# Altium footprint library Altium_Lib_Haris.PcbLib: 85 footprints (part 4 of 6)
Each footprint in its own frame and in the unit in brackets; x right, y up, seen from the top. Pads: shape width x height; smd on the part's side, far side on the other; paste and mask are expansions set on the pad; w line width, h text height; cw(c..) or ccw(c..) is an arc to the next point about the centre after c.
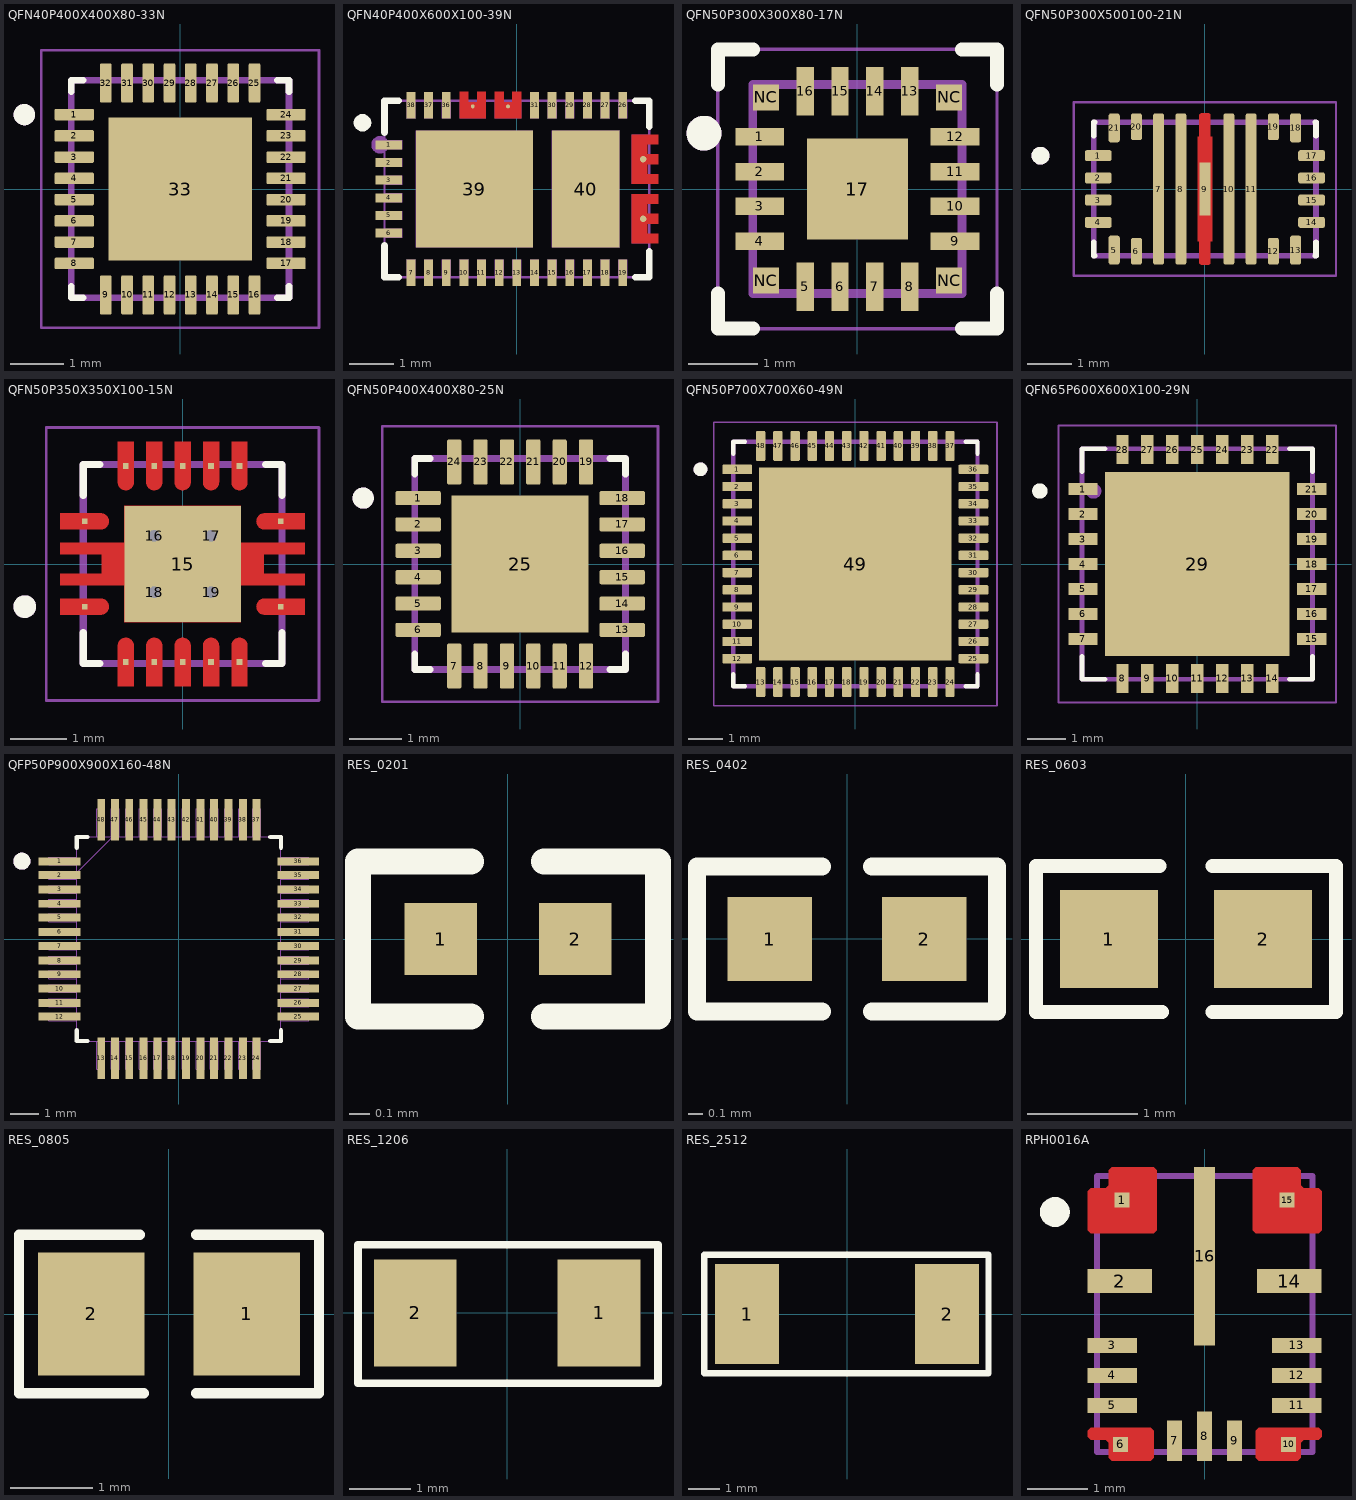
[diagram p3: the footprints below, top view; thin cyan lines are the x and y axes]

## QFN40P400X400X80-33N [mm]
pads (33):
  rrect25% 0.74x0.22 smd paste+0 mask+0.102: 1(-1.995,1.4) 2(-1.995,1) 3(-1.995,0.6) 4(-1.995,0.2) 5(-1.995,-0.2) 6(-1.995,-0.6) 7(-1.995,-1) 8(-1.995,-1.4) 17(1.995,-1.4) 18(1.995,-1) 19(1.995,-0.6) 20(1.995,-0.2) 21(1.995,0.2) 22(1.995,0.6) 23(1.995,1) 24(1.995,1.4)
  rrect25% 0.22x0.74 smd paste+0 mask+0.102: 9(-1.4,-1.995) 10(-1,-1.995) 11(-0.6,-1.995) 12(-0.2,-1.995) 13(0.2,-1.995) 14(0.6,-1.995) 15(1,-1.995) 16(1.4,-1.995) 25(1.4,1.995) 26(1,1.995) 27(0.6,1.995) 28(0.2,1.995) 29(-0.2,1.995) 30(-0.6,1.995) 31(-1,1.995) 32(-1.4,1.995)
  rect 2.7x2.7 smd paste-0.5 mask+0.102: 33(0,0)
Top Overlay:
  circle w0.2: c-2.935,1.4 r0.1
  lines w0.127: -2.05,-1.83 -2.05,-2.05 -1.83,-2.05 ; -2.05,1.83 -2.05,2.05 -1.83,2.05 ; 1.83,-2.05 2.05,-2.05 2.05,-1.83 ; 1.83,2.05 2.05,2.05 2.05,1.83
Mechanical 13:
  circle w0.2: c-2.935,1.4 r0.1
  lines w0.127: -2.05,-2.05 2.05,-2.05 2.05,2.05 -2.05,2.05 -2.05,-2.05
Mechanical 15:
  lines w0.05: -2.615,-2.615 2.615,-2.615 2.615,2.615 -2.615,2.615 -2.615,-2.615
3D body "step_temp.STEP": height 0.8, standoff 0, extent -2,-2 2,2

## QFN40P400X600X100-39N [mil]
pads (34):
  rect 23.6x7.9 smd paste-3937 mask+2: 1(-114.1,39.4) 2(-114.1,23.6) 3(-114.1,7.9) 4(-114.1,-7.9) 5(-114.1,-23.6) 6(-114.1,-39.4)
  rect 7.9x23.6 smd paste-3937 mask+2: 7(-94.4,-74.8) 8(-78.7,-74.8) 9(-62.9,-74.8) 10(-47.2,-74.8) 11(-31.5,-74.8) 12(-15.7,-74.8) 13(0,-74.8) 14(15.8,-74.8) 15(31.5,-74.8) 16(47.3,-74.8) 17(63,-74.8) 18(78.8,-74.8) 19(94.5,-74.8) 26(94.5,74.8) 27(78.8,74.8) 28(63,74.8) 29(47.3,74.8) 30(31.5,74.8) 31(15.8,74.8) 36(-62.9,74.8) 37(-78.7,74.8) 38(-94.4,74.8)
  round 5.7 smd: 21(112.8,-26.6) 24(112.8,26.6)
  round 3.5 smd: 32(-7.8,73.7) 34(-39.3,73.7)
  rect 104.3x104.3 smd paste-3937 mask+2: 39(-37.9,0)
  rect 60.2x104.3 smd paste-3937 mask+2: 40(61.5,0)
Top Layer:
  region: 126,-13.2 126,-4.5 116.6,-4.5 102.4,-4.5 102.4,-13.2 102.4,-22.2 102.4,-30.9 102.4,-39.9 102.4,-48.6 116.6,-48.6 126,-48.6 126,-39.9 116.6,-39.9 116.6,-30.9 126,-30.9 126,-22.2 116.6,-22.2 116.6,-13.2
  region: 126,40 126,48.6 116.6,48.6 102.4,48.6 102.4,40 102.4,30.9 102.4,22.3 102.4,13.2 102.4,4.5 116.6,4.5 126,4.5 126,13.2 116.6,13.2 116.6,22.3 126,22.3 126,30.9 116.6,30.9 116.6,40
  region: 4,63 4,86.6 -3.9,86.6 -3.9,77.2 -11.8,77.2 -11.8,86.6 -19.6,86.6 -19.6,77.2 -19.7,77.2 -19.7,63 -19.6,63 -11.8,63 -3.9,63 4,63
  region: -27.5,77.2 -27.5,86.6 -35.4,86.6 -35.4,77.2 -43.3,77.2 -43.3,86.6 -51.1,86.6 -51.1,77.2 -51.1,63 -43.3,63 -35.4,63 -27.5,63 -27.5,77.2
Top Overlay:
  lines w6: -118.1,-50.4 -118.1,-78.7 -105.5,-78.7 ; -118.1,50.4 -118.1,78.8 -105.5,78.8 ; 105.6,-78.7 118.1,-78.7 118.1,-55.7 ; 105.6,78.8 118.1,78.8 118.1,55.7
  lines w7.9: -141.7,59.1 -141.3,57.4 -140.2,56 -138.6,55.2 -136.9,55.2 -135.3,56 -134.2,57.4 -133.8,59.1 -134.2,60.8 -135.3,62.1 -136.9,62.9 -138.6,62.9 -140.2,62.1 -141.3,60.8 -141.7,59.1
Top Paste:
  drawing of 34 lines, arcs and shapes, not listed
Mechanical 6:
  lines w7.9: -125.9,39.4 -125.6,37.7 -124.5,36.3 -122.9,35.5 -121.1,35.5 -119.6,36.3 -118.5,37.7 -118.1,39.4 -118.5,41.1 -119.6,42.5 -121.1,43.2 -122.9,43.2 -124.5,42.5 -125.6,41.1 -125.9,39.4
Mechanical 7:
  lines w2: -118.1,-78.7 118.1,-78.7 118.1,78.8 -118.1,78.8 -118.1,-78.7
Mechanical 8:
  region: -115.7,78.8 -116.1,77.5 -117.1,76.6 -118.4,76.4 -119.6,77 -120.3,78.1 -120.3,79.4 -119.6,80.5 -118.4,81.1 -117.1,80.9 -116.1,80
Mechanical 9:
  drawing of 44 lines, arcs and shapes, not listed
3D body "TPS25751DREFR--3DModel-STEP-56544.STEP": height 32, standoff 0.5, extent -118.11,-78.74 118.11,78.74

## QFN50P300X300X80-17N [mm]
pads (21):
  rect 0.7x0.25 smd: 1(-1.4,0.75) 2(-1.4,0.25) 3(-1.4,-0.25) 4(-1.4,-0.75) 9(1.4,-0.75) 10(1.4,-0.25) 11(1.4,0.25) 12(1.4,0.75)
  rect 0.25x0.7 smd: 5(-0.75,-1.4) 6(-0.25,-1.4) 7(0.25,-1.4) 8(0.75,-1.4) 13(0.75,1.4) 14(0.25,1.4) 15(-0.25,1.4) 16(-0.75,1.4)
  rect 1.45x1.45 smd paste-0.266: 17(0,0)
  rect 0.375x0.375 smd: NC(-1.312,-1.312) NC(-1.312,1.312) NC(1.312,-1.312) NC(1.312,1.312)
Top Overlay:
  circle w0.3: c-2.2,0.8 r0.1
  lines w0.2: -2,-1.5 -2,-2 -1.5,-2 ; -2,1.5 -2,2 -1.5,2 ; 1.5,-2 2,-2 2,-1.5 ; 1.5,2 2,2 2,1.5
Mechanical 13:
  circle w0.3: c-2.2,0.8 r0.1
  lines w0.127: -1.5,-1.5 -1.5,1.5 1.5,1.5 1.5,-1.5 -1.5,-1.5
Mechanical 15:
  lines w0.05: -2,-2 -2,2 2,2 2,-2 -2,-2
3D body "step_temp.STEP": height 1.03, standoff 0, extent -1.5,-1.5 1.5,1.5

## QFN50P300X500100-21N [mm]
height 1
pads (21):
  rrect40% 0.6x0.25 smd paste-1 mask+0: 1(-2.4,0.75) 2(-2.4,0.25) 3(-2.4,-0.25) 4(-2.4,-0.75) 14(2.4,-0.75) 15(2.4,-0.25) 16(2.4,0.25) 17(2.4,0.75)
  rrect40% 0.25x0.65 smd paste-1 mask+0: 5(-2.04,-1.375) 13(2.04,-1.375) 18(2.04,1.375) 21(-2.04,1.375)
  rrect40% 0.25x0.6 smd paste-1 mask+0: 6(-1.54,-1.4) 12(1.54,-1.4) 19(1.54,1.4) 20(-1.54,1.4)
  rrect40% 0.25x3.4 smd paste-3 mask+0: 7(-1.04,0) 8(-0.54,0) 10(0.54,0) 11(1.04,0)
  rect 0.25x1.2 smd paste-2 mask+0: 9(0,0)
Top Layer:
  region: 0.083,1.699 0.085,1.699 0.088,1.698 0.09,1.698 0.093,1.697 0.095,1.696 0.098,1.695 0.1,1.693 0.102,1.692 0.104,1.69 0.106,1.689 0.108,1.687 0.11,1.685 0.112,1.683 0.114,1.681 0.115,1.679 0.117,1.677 0.118,1.675 0.12,1.673 0.121,1.67 0.122,1.668 0.123,1.665 0.123,1.663 0.124,1.66 0.124,1.658 0.125,1.655 0.125,1.653 0.125,1.65 0.125,1.175 0.165,1.175 0.165,-1.175 0.125,-1.175 0.125,-1.65 0.125,-1.653 0.125,-1.655 0.124,-1.658 0.124,-1.66 0.123,-1.663 0.123,-1.665 0.122,-1.668 0.121,-1.67 0.12,-1.673 0.118,-1.675 0.117,-1.677 0.115,-1.679 0.114,-1.681 0.112,-1.683 0.11,-1.685 0.108,-1.687 0.106,-1.689 0.104,-1.69 0.102,-1.692 0.1,-1.693 0.098,-1.695 0.095,-1.696 0.093,-1.697 0.09,-1.698 0.088,-1.698 0.085,-1.699 0.083,-1.699 0.08,-1.7 -0.08,-1.7 -0.083,-1.699 -0.085,-1.699 -0.088,-1.698 -0.09,-1.698 -0.093,-1.697 -0.095,-1.696 -0.098,-1.695 -0.1,-1.693 -0.102,-1.692 -0.104,-1.69 -0.106,-1.689 -0.108,-1.687 -0.11,-1.685 -0.112,-1.683 -0.114,-1.681 -0.115,-1.679 -0.117,-1.677 -0.118,-1.675 -0.12,-1.673 -0.121,-1.67 -0.122,-1.668 -0.123,-1.665 -0.123,-1.663 -0.124,-1.66 -0.124,-1.658 -0.125,-1.655 -0.125,-1.653 -0.125,-1.65 -0.125,-1.175 -0.165,-1.175 -0.165,1.175 -0.125,1.175 -0.125,1.65 -0.125,1.653 -0.125,1.655 -0.124,1.658 -0.124,1.66 -0.123,1.663 -0.123,1.665 -0.122,1.668 -0.121,1.67 -0.12,1.673 -0.118,1.675 -0.117,1.677 -0.115,1.679 -0.114,1.681 -0.112,1.683 -0.11,1.685 -0.108,1.687 -0.106,1.689 -0.104,1.69 -0.102,1.692 -0.1,1.693 -0.098,1.695 -0.095,1.696 -0.093,1.697 -0.09,1.698 -0.088,1.698 -0.085,1.699 -0.083,1.699 -0.08,1.7 0.08,1.7
Top Overlay:
  circle w0.2: c-3.7,0.75 r0.1
  lines w0.127: -2.5,-1.195 -2.5,-1.5 -2.485,-1.5 ; -2.5,1.195 -2.5,1.5 -2.485,1.5 ; 2.485,-1.5 2.5,-1.5 2.5,-1.195 ; 2.485,1.5 2.5,1.5 2.5,1.195
Top Paste:
  drawing of 31 lines, arcs and shapes, not listed
Top Solder:
  drawing of 21 lines, arcs and shapes, not listed
Mechanical 13:
  circle w0.2: c-3.7,0.75 r0.1
  lines w0.127: -2.5,-1.5 2.5,-1.5 2.5,1.5 -2.5,1.5 -2.5,-1.5
Mechanical 15:
  lines w0.05: -2.95,-1.95 2.95,-1.95 2.95,1.95 -2.95,1.95 -2.95,-1.95
3D body "step_temp.STEP": height 1, standoff 0, extent -2.5,-1.5 2.5,1.5

## QFN50P350X350X100-15N [mm]
pads (19):
  rect 0.1x0.1 smd paste-1 mask+0: 1(-1.725,-0.75) 2(-1,-1.725) 3(-0.5,-1.725) 4(0,-1.725) 5(0.5,-1.725) 6(1,-1.725) 7(1.725,-0.75) 8(1.725,0.75) 9(1,1.725) 10(0.5,1.725) 11(0,1.725) 12(-0.5,1.725) 13(-1,1.725) 14(-1.725,0.75)
  rect 2.05x2.05 smd paste-2 mask+0: 15(0,0)
  round 0.4 hole 0.2 mask+0: 16(-0.5,0.5) 17(0.5,0.5) 18(-0.5,-0.5) 19(0.5,-0.5)
Top Layer:
  region: 2.15,0.61 1.44,0.61 1.433,0.61 1.425,0.611 1.418,0.612 1.411,0.613 1.404,0.615 1.397,0.617 1.39,0.619 1.383,0.622 1.376,0.625 1.37,0.629 1.364,0.633 1.358,0.637 1.352,0.641 1.346,0.646 1.341,0.651 1.336,0.656 1.331,0.662 1.327,0.668 1.323,0.674 1.319,0.68 1.315,0.686 1.312,0.693 1.309,0.7 1.307,0.707 1.305,0.714 1.303,0.721 1.302,0.728 1.301,0.735 1.3,0.743 1.3,0.75 1.3,0.757 1.301,0.765 1.302,0.772 1.303,0.779 1.305,0.786 1.307,0.793 1.309,0.8 1.312,0.807 1.315,0.814 1.319,0.82 1.323,0.826 1.327,0.832 1.331,0.838 1.336,0.844 1.341,0.849 1.346,0.854 1.352,0.859 1.358,0.863 1.364,0.867 1.37,0.871 1.376,0.875 1.383,0.878 1.39,0.881 1.397,0.883 1.404,0.885 1.411,0.887 1.418,0.888 1.425,0.889 1.433,0.89 1.44,0.89 2.15,0.89
  region: 1.025,0.375 2.15,0.375 2.15,0.175 1.425,0.175 1.425,-0.175 2.15,-0.175 2.15,-0.375 1.025,-0.375 1.025,-1.025 -1.025,-1.025 -1.025,-0.375 -2.15,-0.375 -2.15,-0.175 -1.425,-0.175 -1.425,0.175 -2.15,0.175 -2.15,0.375 -1.025,0.375 -1.025,1.025 1.025,1.025
  region: 1.14,1.44 1.14,1.433 1.139,1.425 1.138,1.418 1.137,1.411 1.135,1.404 1.133,1.397 1.131,1.39 1.128,1.383 1.125,1.376 1.121,1.37 1.117,1.364 1.113,1.358 1.109,1.352 1.104,1.346 1.099,1.341 1.094,1.336 1.088,1.331 1.082,1.327 1.076,1.323 1.07,1.319 1.064,1.315 1.057,1.312 1.05,1.309 1.043,1.307 1.036,1.305 1.029,1.303 1.022,1.302 1.015,1.301 1.007,1.3 1,1.3 0.993,1.3 0.985,1.301 0.978,1.302 0.971,1.303 0.964,1.305 0.957,1.307 0.95,1.309 0.943,1.312 0.936,1.315 0.93,1.319 0.924,1.323 0.918,1.327 0.912,1.331 0.906,1.336 0.901,1.341 0.896,1.346 0.891,1.352 0.887,1.358 0.883,1.364 0.879,1.37 0.875,1.376 0.872,1.383 0.869,1.39 0.867,1.397 0.865,1.404 0.863,1.411 0.862,1.418 0.861,1.425 0.86,1.433 0.86,1.44 0.86,2.15 1.14,2.15
  region: 0.64,1.44 0.64,1.433 0.639,1.425 0.638,1.418 0.637,1.411 0.635,1.404 0.633,1.397 0.631,1.39 0.628,1.383 0.625,1.376 0.621,1.37 0.617,1.364 0.613,1.358 0.609,1.352 0.604,1.346 0.599,1.341 0.594,1.336 0.588,1.331 0.582,1.327 0.576,1.323 0.57,1.319 0.564,1.315 0.557,1.312 0.55,1.309 0.543,1.307 0.536,1.305 0.529,1.303 0.522,1.302 0.515,1.301 0.507,1.3 0.5,1.3 0.493,1.3 0.485,1.301 0.478,1.302 0.471,1.303 0.464,1.305 0.457,1.307 0.45,1.309 0.443,1.312 0.436,1.315 0.43,1.319 0.424,1.323 0.418,1.327 0.412,1.331 0.406,1.336 0.401,1.341 0.396,1.346 0.391,1.352 0.387,1.358 0.383,1.364 0.379,1.37 0.375,1.376 0.372,1.383 0.369,1.39 0.367,1.397 0.365,1.404 0.363,1.411 0.362,1.418 0.361,1.425 0.36,1.433 0.36,1.44 0.36,2.15 0.64,2.15
  region: -0.36,1.44 -0.36,1.433 -0.361,1.425 -0.362,1.418 -0.363,1.411 -0.365,1.404 -0.367,1.397 -0.369,1.39 -0.372,1.383 -0.375,1.376 -0.379,1.37 -0.383,1.364 -0.387,1.358 -0.391,1.352 -0.396,1.346 -0.401,1.341 -0.406,1.336 -0.412,1.331 -0.418,1.327 -0.424,1.323 -0.43,1.319 -0.436,1.315 -0.443,1.312 -0.45,1.309 -0.457,1.307 -0.464,1.305 -0.471,1.303 -0.478,1.302 -0.485,1.301 -0.493,1.3 -0.5,1.3 -0.507,1.3 -0.515,1.301 -0.522,1.302 -0.529,1.303 -0.536,1.305 -0.543,1.307 -0.55,1.309 -0.557,1.312 -0.564,1.315 -0.57,1.319 -0.576,1.323 -0.582,1.327 -0.588,1.331 -0.594,1.336 -0.599,1.341 -0.604,1.346 -0.609,1.352 -0.613,1.358 -0.617,1.364 -0.621,1.37 -0.625,1.376 -0.628,1.383 -0.631,1.39 -0.633,1.397 -0.635,1.404 -0.637,1.411 -0.638,1.418 -0.639,1.425 -0.64,1.433 -0.64,1.44 -0.64,2.15 -0.36,2.15
  region: -0.86,1.44 -0.86,1.433 -0.861,1.425 -0.862,1.418 -0.863,1.411 -0.865,1.404 -0.867,1.397 -0.869,1.39 -0.872,1.383 -0.875,1.376 -0.879,1.37 -0.883,1.364 -0.887,1.358 -0.891,1.352 -0.896,1.346 -0.901,1.341 -0.906,1.336 -0.912,1.331 -0.918,1.327 -0.924,1.323 -0.93,1.319 -0.936,1.315 -0.943,1.312 -0.95,1.309 -0.957,1.307 -0.964,1.305 -0.971,1.303 -0.978,1.302 -0.985,1.301 -0.993,1.3 -1,1.3 -1.007,1.3 -1.015,1.301 -1.022,1.302 -1.029,1.303 -1.036,1.305 -1.043,1.307 -1.05,1.309 -1.057,1.312 -1.064,1.315 -1.07,1.319 -1.076,1.323 -1.082,1.327 -1.088,1.331 -1.094,1.336 -1.099,1.341 -1.104,1.346 -1.109,1.352 -1.113,1.358 -1.117,1.364 -1.121,1.37 -1.125,1.376 -1.128,1.383 -1.131,1.39 -1.133,1.397 -1.135,1.404 -1.137,1.411 -1.138,1.418 -1.139,1.425 -1.14,1.433 -1.14,1.44 -1.14,2.15 -0.86,2.15
  region: -1.433,0.89 -1.425,0.889 -1.418,0.888 -1.411,0.887 -1.404,0.885 -1.397,0.883 -1.39,0.881 -1.383,0.878 -1.376,0.875 -1.37,0.871 -1.364,0.867 -1.358,0.863 -1.352,0.859 -1.346,0.854 -1.341,0.849 -1.336,0.844 -1.331,0.838 -1.327,0.832 -1.323,0.826 -1.319,0.82 -1.315,0.814 -1.312,0.807 -1.309,0.8 -1.307,0.793 -1.305,0.786 -1.303,0.779 -1.302,0.772 -1.301,0.765 -1.3,0.757 -1.3,0.75 -1.3,0.743 -1.301,0.735 -1.302,0.728 -1.303,0.721 -1.305,0.714 -1.307,0.707 -1.309,0.7 -1.312,0.693 -1.315,0.686 -1.319,0.68 -1.323,0.674 -1.327,0.668 -1.331,0.662 -1.336,0.656 -1.341,0.651 -1.346,0.646 -1.352,0.641 -1.358,0.637 -1.364,0.633 -1.37,0.629 -1.376,0.625 -1.383,0.622 -1.39,0.619 -1.397,0.617 -1.404,0.615 -1.411,0.613 -1.418,0.612 -1.425,0.611 -1.433,0.61 -1.44,0.61 -2.15,0.61 -2.15,0.89 -1.44,0.89
  region: -1.433,-0.61 -1.425,-0.611 -1.418,-0.612 -1.411,-0.613 -1.404,-0.615 -1.397,-0.617 -1.39,-0.619 -1.383,-0.622 -1.376,-0.625 -1.37,-0.629 -1.364,-0.633 -1.358,-0.637 -1.352,-0.641 -1.346,-0.646 -1.341,-0.651 -1.336,-0.656 -1.331,-0.662 -1.327,-0.668 -1.323,-0.674 -1.319,-0.68 -1.315,-0.686 -1.312,-0.693 -1.309,-0.7 -1.307,-0.707 -1.305,-0.714 -1.303,-0.721 -1.302,-0.728 -1.301,-0.735 -1.3,-0.743 -1.3,-0.75 -1.3,-0.757 -1.301,-0.765 -1.302,-0.772 -1.303,-0.779 -1.305,-0.786 -1.307,-0.793 -1.309,-0.8 -1.312,-0.807 -1.315,-0.814 -1.319,-0.82 -1.323,-0.826 -1.327,-0.832 -1.331,-0.838 -1.336,-0.844 -1.341,-0.849 -1.346,-0.854 -1.352,-0.859 -1.358,-0.863 -1.364,-0.867 -1.37,-0.871 -1.376,-0.875 -1.383,-0.878 -1.39,-0.881 -1.397,-0.883 -1.404,-0.885 -1.411,-0.887 -1.418,-0.888 -1.425,-0.889 -1.433,-0.89 -1.44,-0.89 -2.15,-0.89 -2.15,-0.61 -1.44,-0.61
  region: 0.14,1.44 0.14,1.433 0.139,1.425 0.138,1.418 0.137,1.411 0.135,1.404 0.133,1.397 0.131,1.39 0.128,1.383 0.125,1.376 0.121,1.37 0.117,1.364 0.113,1.358 0.109,1.352 0.104,1.346 0.099,1.341 0.094,1.336 0.088,1.331 0.082,1.327 0.076,1.323 0.07,1.319 0.064,1.315 0.057,1.312 0.05,1.309 0.043,1.307 0.036,1.305 0.029,1.303 0.022,1.302 0.015,1.301 0.007,1.3 0,1.3 -0.007,1.3 -0.015,1.301 -0.022,1.302 -0.029,1.303 -0.036,1.305 -0.043,1.307 -0.05,1.309 -0.057,1.312 -0.064,1.315 -0.07,1.319 -0.076,1.323 -0.082,1.327 -0.088,1.331 -0.094,1.336 -0.099,1.341 -0.104,1.346 -0.109,1.352 -0.113,1.358 -0.117,1.364 -0.121,1.37 -0.125,1.376 -0.128,1.383 -0.131,1.39 -0.133,1.397 -0.135,1.404 -0.137,1.411 -0.138,1.418 -0.139,1.425 -0.14,1.433 -0.14,1.44 -0.14,2.15 0.14,2.15
  region: 1.007,-1.3 1.015,-1.301 1.022,-1.302 1.029,-1.303 1.036,-1.305 1.043,-1.307 1.05,-1.309 1.057,-1.312 1.064,-1.315 1.07,-1.319 1.076,-1.323 1.082,-1.327 1.088,-1.331 1.094,-1.336 1.099,-1.341 1.104,-1.346 1.109,-1.352 1.113,-1.358 1.117,-1.364 1.121,-1.37 1.125,-1.376 1.128,-1.383 1.131,-1.39 1.133,-1.397 1.135,-1.404 1.137,-1.411 1.138,-1.418 1.139,-1.425 1.14,-1.433 1.14,-1.44 1.14,-2.15 0.86,-2.15 0.86,-1.44 0.86,-1.433 0.861,-1.425 0.862,-1.418 0.863,-1.411 0.865,-1.404 0.867,-1.397 0.869,-1.39 0.872,-1.383 0.875,-1.376 0.879,-1.37 0.883,-1.364 0.887,-1.358 0.891,-1.352 0.896,-1.346 0.901,-1.341 0.906,-1.336 0.912,-1.331 0.918,-1.327 0.924,-1.323 0.93,-1.319 0.936,-1.315 0.943,-1.312 0.95,-1.309 0.957,-1.307 0.964,-1.305 0.971,-1.303 0.978,-1.302 0.985,-1.301 0.993,-1.3 1,-1.3
  region: 0.507,-1.3 0.515,-1.301 0.522,-1.302 0.529,-1.303 0.536,-1.305 0.543,-1.307 0.55,-1.309 0.557,-1.312 0.564,-1.315 0.57,-1.319 0.576,-1.323 0.582,-1.327 0.588,-1.331 0.594,-1.336 0.599,-1.341 0.604,-1.346 0.609,-1.352 0.613,-1.358 0.617,-1.364 0.621,-1.37 0.625,-1.376 0.628,-1.383 0.631,-1.39 0.633,-1.397 0.635,-1.404 0.637,-1.411 0.638,-1.418 0.639,-1.425 0.64,-1.433 0.64,-1.44 0.64,-2.15 0.36,-2.15 0.36,-1.44 0.36,-1.433 0.361,-1.425 0.362,-1.418 0.363,-1.411 0.365,-1.404 0.367,-1.397 0.369,-1.39 0.372,-1.383 0.375,-1.376 0.379,-1.37 0.383,-1.364 0.387,-1.358 0.391,-1.352 0.396,-1.346 0.401,-1.341 0.406,-1.336 0.412,-1.331 0.418,-1.327 0.424,-1.323 0.43,-1.319 0.436,-1.315 0.443,-1.312 0.45,-1.309 0.457,-1.307 0.464,-1.305 0.471,-1.303 0.478,-1.302 0.485,-1.301 0.493,-1.3 0.5,-1.3
  region: -0.493,-1.3 -0.485,-1.301 -0.478,-1.302 -0.471,-1.303 -0.464,-1.305 -0.457,-1.307 -0.45,-1.309 -0.443,-1.312 -0.436,-1.315 -0.43,-1.319 -0.424,-1.323 -0.418,-1.327 -0.412,-1.331 -0.406,-1.336 -0.401,-1.341 -0.396,-1.346 -0.391,-1.352 -0.387,-1.358 -0.383,-1.364 -0.379,-1.37 -0.375,-1.376 -0.372,-1.383 -0.369,-1.39 -0.367,-1.397 -0.365,-1.404 -0.363,-1.411 -0.362,-1.418 -0.361,-1.425 -0.36,-1.433 -0.36,-1.44 -0.36,-2.15 -0.64,-2.15 -0.64,-1.44 -0.64,-1.433 -0.639,-1.425 -0.638,-1.418 -0.637,-1.411 -0.635,-1.404 -0.633,-1.397 -0.631,-1.39 -0.628,-1.383 -0.625,-1.376 -0.621,-1.37 -0.617,-1.364 -0.613,-1.358 -0.609,-1.352 -0.604,-1.346 -0.599,-1.341 -0.594,-1.336 -0.588,-1.331 -0.582,-1.327 -0.576,-1.323 -0.57,-1.319 -0.564,-1.315 -0.557,-1.312 -0.55,-1.309 -0.543,-1.307 -0.536,-1.305 -0.529,-1.303 -0.522,-1.302 -0.515,-1.301 -0.507,-1.3 -0.5,-1.3
  region: -0.993,-1.3 -0.985,-1.301 -0.978,-1.302 -0.971,-1.303 -0.964,-1.305 -0.957,-1.307 -0.95,-1.309 -0.943,-1.312 -0.936,-1.315 -0.93,-1.319 -0.924,-1.323 -0.918,-1.327 -0.912,-1.331 -0.906,-1.336 -0.901,-1.341 -0.896,-1.346 -0.891,-1.352 -0.887,-1.358 -0.883,-1.364 -0.879,-1.37 -0.875,-1.376 -0.872,-1.383 -0.869,-1.39 -0.867,-1.397 -0.865,-1.404 -0.863,-1.411 -0.862,-1.418 -0.861,-1.425 -0.86,-1.433 -0.86,-1.44 -0.86,-2.15 -1.14,-2.15 -1.14,-1.44 -1.14,-1.433 -1.139,-1.425 -1.138,-1.418 -1.137,-1.411 -1.135,-1.404 -1.133,-1.397 -1.131,-1.39 -1.128,-1.383 -1.125,-1.376 -1.121,-1.37 -1.117,-1.364 -1.113,-1.358 -1.109,-1.352 -1.104,-1.346 -1.099,-1.341 -1.094,-1.336 -1.088,-1.331 -1.082,-1.327 -1.076,-1.323 -1.07,-1.319 -1.064,-1.315 -1.057,-1.312 -1.05,-1.309 -1.043,-1.307 -1.036,-1.305 -1.029,-1.303 -1.022,-1.302 -1.015,-1.301 -1.007,-1.3 -1,-1.3
  region: 0.007,-1.3 0.015,-1.301 0.022,-1.302 0.029,-1.303 0.036,-1.305 0.043,-1.307 0.05,-1.309 0.057,-1.312 0.064,-1.315 0.07,-1.319 0.076,-1.323 0.082,-1.327 0.088,-1.331 0.094,-1.336 0.099,-1.341 0.104,-1.346 0.109,-1.352 0.113,-1.358 0.117,-1.364 0.121,-1.37 0.125,-1.376 0.128,-1.383 0.131,-1.39 0.133,-1.397 0.135,-1.404 0.137,-1.411 0.138,-1.418 0.139,-1.425 0.14,-1.433 0.14,-1.44 0.14,-2.15 -0.14,-2.15 -0.14,-1.44 -0.14,-1.433 -0.139,-1.425 -0.138,-1.418 -0.137,-1.411 -0.135,-1.404 -0.133,-1.397 -0.131,-1.39 -0.128,-1.383 -0.125,-1.376 -0.121,-1.37 -0.117,-1.364 -0.113,-1.358 -0.109,-1.352 -0.104,-1.346 -0.099,-1.341 -0.094,-1.336 -0.088,-1.331 -0.082,-1.327 -0.076,-1.323 -0.07,-1.319 -0.064,-1.315 -0.057,-1.312 -0.05,-1.309 -0.043,-1.307 -0.036,-1.305 -0.029,-1.303 -0.022,-1.302 -0.015,-1.301 -0.007,-1.3 0,-1.3
  region: 2.15,-0.89 1.44,-0.89 1.433,-0.89 1.425,-0.889 1.418,-0.888 1.411,-0.887 1.404,-0.885 1.397,-0.883 1.39,-0.881 1.383,-0.878 1.376,-0.875 1.37,-0.871 1.364,-0.867 1.358,-0.863 1.352,-0.859 1.346,-0.854 1.341,-0.849 1.336,-0.844 1.331,-0.838 1.327,-0.832 1.323,-0.826 1.319,-0.82 1.315,-0.814 1.312,-0.807 1.309,-0.8 1.307,-0.793 1.305,-0.786 1.303,-0.779 1.302,-0.772 1.301,-0.765 1.3,-0.757 1.3,-0.75 1.3,-0.743 1.301,-0.735 1.302,-0.728 1.303,-0.721 1.305,-0.714 1.307,-0.707 1.309,-0.7 1.312,-0.693 1.315,-0.686 1.319,-0.68 1.323,-0.674 1.327,-0.668 1.331,-0.662 1.336,-0.656 1.341,-0.651 1.346,-0.646 1.352,-0.641 1.358,-0.637 1.364,-0.633 1.37,-0.629 1.376,-0.625 1.383,-0.622 1.39,-0.619 1.397,-0.617 1.404,-0.615 1.411,-0.613 1.418,-0.612 1.425,-0.611 1.433,-0.61 1.44,-0.61 2.15,-0.61
Top Overlay:
  circle w0.2: c-2.78,-0.75 r0.1
  lines w0.127: -1.75,-1.21 -1.75,-1.75 -1.46,-1.75 ; -1.75,1.21 -1.75,1.75 -1.46,1.75 ; 1.46,-1.75 1.75,-1.75 1.75,-1.21 ; 1.46,1.75 1.75,1.75 1.75,1.21
Top Paste:
  drawing of 22 lines, arcs and shapes, not listed
Top Solder:
  drawing of 15 lines, arcs and shapes, not listed
Mechanical 13:
  circle w0.2: c-2.78,-0.75 r0.1
  lines w0.127: -1.75,-1.75 -1.75,1.75 1.75,1.75 1.75,-1.75 -1.75,-1.75
Mechanical 15:
  lines w0.05: -2.4,-2.4 -2.4,2.4 2.4,2.4 2.4,-2.4 -2.4,-2.4
3D body "TPS54623RHLR.STEP": height 1.01, standoff 0.01, extent -1.75,-1.775 1.75,1.725

## QFN50P400X400X80-25N [mm]
pads (25):
  rrect25% 0.86x0.27 smd: 1(-1.935,1.25) 2(-1.935,0.75) 3(-1.935,0.25) 4(-1.935,-0.25) 5(-1.935,-0.75) 6(-1.935,-1.25) 13(1.935,-1.25) 14(1.935,-0.75) 15(1.935,-0.25) 16(1.935,0.25) 17(1.935,0.75) 18(1.935,1.25)
  rrect25% 0.27x0.86 smd: 7(-1.25,-1.935) 8(-0.75,-1.935) 9(-0.25,-1.935) 10(0.25,-1.935) 11(0.75,-1.935) 12(1.25,-1.935) 19(1.25,1.935) 20(0.75,1.935) 21(0.25,1.935) 22(-0.25,1.935) 23(-0.75,1.935) 24(-1.25,1.935)
  rect 2.6x2.6 smd paste-2: 25(0,0)
Top Overlay:
  circle w0.2: c-2.975,1.25 r0.1
  lines w0.127: -2,-1.705 -2,-2 -1.705,-2 ; -2,1.705 -2,2 -1.705,2 ; 1.705,-2 2,-2 2,-1.705 ; 1.705,2 2,2 2,1.705
Top Paste:
  region: 0.82,-0.82 -0.82,-0.82 -0.82,0.82 0.82,0.82
Mechanical 13:
  circle w0.2: c-2.975,1.25 r0.1
  lines w0.127: -2,-2 2,-2 2,2 -2,2 -2,-2
Mechanical 15:
  lines w0.05: -2.615,-2.615 2.615,-2.615 2.615,2.615 -2.615,2.615 -2.615,-2.615
3D body "step_temp.STEP": height 0.8, standoff 0, extent -2,-2 2,2

## QFN50P700X700X60-49N [mm]
pads (49):
  rrect25% 0.87x0.27 smd paste+0 mask+0.102: 1(-3.43,2.75) 2(-3.43,2.25) 3(-3.43,1.75) 4(-3.43,1.25) 5(-3.43,0.75) 6(-3.43,0.25) 7(-3.43,-0.25) 8(-3.43,-0.75) 9(-3.43,-1.25) 10(-3.43,-1.75) 11(-3.43,-2.25) 12(-3.43,-2.75) 25(3.43,-2.75) 26(3.43,-2.25) 27(3.43,-1.75) 28(3.43,-1.25) 29(3.43,-0.75) 30(3.43,-0.25) 31(3.43,0.25) 32(3.43,0.75) 33(3.43,1.25) 34(3.43,1.75) 35(3.43,2.25) 36(3.43,2.75)
  rrect25% 0.27x0.87 smd paste+0 mask+0.102: 13(-2.75,-3.43) 14(-2.25,-3.43) 15(-1.75,-3.43) 16(-1.25,-3.43) 17(-0.75,-3.43) 18(-0.25,-3.43) 19(0.25,-3.43) 20(0.75,-3.43) 21(1.25,-3.43) 22(1.75,-3.43) 23(2.25,-3.43) 24(2.75,-3.43) 37(2.75,3.43) 38(2.25,3.43) 39(1.75,3.43) 40(1.25,3.43) 41(0.75,3.43) 42(0.25,3.43) 43(-0.25,3.43) 44(-0.75,3.43) 45(-1.25,3.43) 46(-1.75,3.43) 47(-2.25,3.43) 48(-2.75,3.43)
  rect 5.6x5.6 smd paste-4 mask+0.102: 49(0,0)
Top Overlay:
  circle w0.2: c-4.5,2.75 r0.1
  lines w0.127: -3.55,-3.205 -3.55,-3.55 -3.205,-3.55 ; -3.55,3.205 -3.55,3.55 -3.205,3.55 ; 3.205,-3.55 3.55,-3.55 3.55,-3.205 ; 3.205,3.55 3.55,3.55 3.55,3.205
Top Paste:
  region: 2.29,-2.29 0.51,-2.29 0.51,-0.51 2.29,-0.51
  region: -0.51,-2.29 -2.29,-2.29 -2.29,-0.51 -0.51,-0.51
  region: 2.29,0.51 0.51,0.51 0.51,2.29 2.29,2.29
  region: -0.51,0.51 -2.29,0.51 -2.29,2.29 -0.51,2.29
Mechanical 13:
  circle w0.2: c-4.5,2.75 r0.1
  lines w0.127: -3.55,-3.55 -3.55,3.55 3.55,3.55 3.55,-3.55 -3.55,-3.55
Mechanical 15:
  lines w0.05: -4.115,-4.115 -4.115,4.115 4.115,4.115 4.115,-4.115 -4.115,-4.115
3D body "step_temp.STEP": height 0.65, standoff 0, extent -3.5,-3.5 3.5,3.5

## QFN65P600X600X100-29N [mm]
pads (29):
  rect 0.76x0.32 smd: 1(-2.98,1.95) 2(-2.98,1.3) 3(-2.98,0.65) 4(-2.98,0) 5(-2.98,-0.65) 6(-2.98,-1.3) 7(-2.98,-1.95) 15(2.98,-1.95) 16(2.98,-1.3) 17(2.98,-0.65) 18(2.98,0) 19(2.98,0.65) 20(2.98,1.3) 21(2.98,1.95)
  rect 0.32x0.76 smd: 8(-1.95,-2.98) 9(-1.3,-2.98) 10(-0.65,-2.98) 11(0,-2.98) 12(0.65,-2.98) 13(1.3,-2.98) 14(1.95,-2.98) 22(1.95,2.98) 23(1.3,2.98) 24(0.65,2.98) 25(0,2.98) 26(-0.65,2.98) 27(-1.3,2.98) 28(-1.95,2.98)
  rect 4.8x4.8 smd paste-3: 29(0,0)
Top Overlay:
  circle w0.2: c-4.1,1.9 r0.1
  lines w0.127: -3,-2.4 -3,-3 -2.4,-3 ; -3,2.4 -3,3 -2.4,3 ; 2.4,-3 3,-3 3,-2.4 ; 2.4,3 3,3 3,2.4
Top Paste:
  region: 1.515,-1.63 -1.63,-1.63 -1.63,1.515 1.515,1.515
Mechanical 13:
  circle w0.2: c-2.7,1.9 r0.1
  lines w0.127: -3,-3 3,-3 3,3 -3,3 -3,-3
Mechanical 15:
  lines w0.05: -3.61,-3.61 -3.61,3.61 3.61,3.61 3.61,-3.61 -3.61,-3.61
3D body "step_temp.STEP": height 1, standoff 0, extent -3,-3 3,3

## QFP50P900X900X160-48N [mil]
pads (48):
  rect 58x11 smd: 1(-166,108) 2(-166,89) 3(-166,69) 4(-166,49) 5(-166,30) 6(-166,10) 7(-166,-10) 8(-166,-30) 9(-166,-49) 10(-166,-69) 11(-166,-89) 12(-166,-108) 25(166,-108) 26(166,-89) 27(166,-69) 28(166,-49) 29(166,-30) 30(166,-10) 31(166,10) 32(166,30) 33(166,49) 34(166,69) 35(166,89) 36(166,108)
  rect 11x58 smd: 13(-108,-166) 14(-89,-166) 15(-69,-166) 16(-49,-166) 17(-30,-166) 18(-10,-166) 19(10,-166) 20(30,-166) 21(49,-166) 22(69,-166) 23(89,-166) 24(108,-166) 37(108,166) 38(89,166) 39(69,166) 40(49,166) 41(30,166) 42(10,166) 43(-10,166) 44(-30,166) 45(-49,166) 46(-69,166) 47(-89,166) 48(-108,166)
Top Overlay:
  circle w15.75: c-218.5,108.27 r3.94
  lines w6: -142,-127 -142,-142 -127,-142 ; -142,127 -142,142 -127,142 ; 127,-142 142,-142 142,-127 ; 127,142 142,142 142,127
Mechanical 13:
  drawing of 252 lines, arcs and shapes, not listed
3D body "step_temp.STEP": height 63.54, standoff 0.55, extent -177.17,-177.17 177.17,177.17

## RES_0201 [mm]
pads (2):
  rect 0.35x0.35 smd mask+0.076: 1(-0.325,0) 2(0.325,0)
Top Overlay:
  lines w0.127: -0.18,-0.375 -0.725,-0.375 -0.725,0.375 -0.18,0.375 ; 0.176,-0.375 0.725,-0.375 0.725,0.375 0.176,0.375
3D body "RES0201.stp": height 0.3, standoff 0, extent -0.3,-0.15 0.3,0.15

## RES_0402 [mm]
pads (2):
  rect 0.6x0.6 smd mask+0.076: 1(-0.552,0) 2(0.548,0)
Top Overlay:
  lines w0.127: -0.18,-0.516 -1.068,-0.516 -1.068,0.516 -0.18,0.516 ; 0.176,-0.516 1.064,-0.516 ; 0.176,0.516 1.064,0.516 ; 1.064,-0.508 1.064,0.514
3D body "res0402-1.step": height 0.3, standoff 0, extent -0.5,-0.25 0.5,0.25

## RES_0603 [mil] "CASE: 0603"
height 19.68
pads (2):
  rect 35x35 smd mask+3: 1(-27.5,0) 2(27.5,0)
Top Overlay:
  lines w5: -9.5,26 -53.5,26 -53.5,-26 -8.5,-26 ; 9.5,-26 53.5,-26 53.5,26 9.5,26
3D body "RES0603.stp": height 17.72, standoff 0, extent -31.98,-15.79 31.01,15.72

## RES_0805 [mm] "Resister"
height 0.65
pads (2):
  rect 1.3x1.5 smd mask+0.076: 1(0.95,0) 2(-0.95,0)
Top Overlay:
  lines w0.127: -0.356,0.965 -1.829,0.965 -1.829,-0.965 -0.305,-0.965 ; 0.33,-0.965 1.829,-0.965 1.829,0.965 0.33,0.965
3D body "RES0805.stp": height 0.5, standoff 0, extent -1,-0.63 1,0.62

## RES_1206 [mm] "CASE: 1206"
height 0.7
pads (2):
  rect 1.35x1.75 smd: 1(1.5,0) 2(-1.5,0)
Top Overlay:
  lines w0.127: -2.438,-1.15 -2.438,1.112 2.462,1.112 2.462,-1.15 -2.438,-1.15
3D body "RES1206.stp": height 0.55, standoff 0, extent -1.55,-0.772 1.55,0.78

## RES_2512 [mil] "CASE: 2512"
height 17.32
pads (2):
  rect 80x125 smd: 1(-125,0) 2(125,0)
Top Overlay:
  lines w7.87: -178.32,-74 -178.32,0 -178.32,74 ; -178,-74 177,-74 177,74 -178,74
3D body: height 19, standoff 0, extent -139,-60.5 -115,61
3D body: height 19, standoff 0, extent 112.5,-60.5 136,61
3D body "RES2512.stp": height 21.65, standoff 0, extent -124.02,-61.02 124.02,61.02

## RPH0016A [mm]
pads (16):
  rect 0.25x0.25 smd paste-0.112 mask+0.051: 1(-1.375,1.9) 6(-1.4,-2.175) 10(1.4,-2.175) 15(1.375,1.9)
  rect 1.075x0.4 smd paste+0 mask+0.051: 2(-1.413,0.55) 14(1.413,0.55)
  rect 0.825x0.25 smd paste+0 mask+0.051: 3(-1.538,-0.525) 4(-1.538,-1.025) 5(-1.538,-1.525) 11(1.538,-1.525) 12(1.538,-1.025) 13(1.538,-0.525)
  rect 0.25x0.675 smd paste+0 mask+0.051: 7(-0.5,-2.113) 9(0.5,-2.113)
  rect 0.25x0.825 smd paste+0 mask+0.051: 8(0,-2.038)
  rect 0.35x2.975 smd paste+0 mask+0.051: 16(0,0.963)
Top Layer:
  region: 1.95,-1.95 1.95,-2.05 1.9,-2.1 1.65,-2.1 1.6,-2.15 1.6,-2.4 1.55,-2.45 0.9,-2.45 0.85,-2.4 0.85,-1.95 0.9,-1.9 1.9,-1.9
  region: -1.95,-1.95 -1.95,-2.05 -1.9,-2.1 -1.65,-2.1 -1.6,-2.15 -1.6,-2.4 -1.55,-2.45 -0.9,-2.45 -0.85,-2.4 -0.85,-1.95 -0.9,-1.9 -1.9,-1.9
  region: -1.9,1.35 -1.95,1.4 -1.95,2.05 -1.9,2.1 -1.65,2.1 -1.6,2.15 -1.6,2.4 -1.55,2.45 -0.85,2.45 -0.8,2.4 -0.8,1.4 -0.85,1.35
  region: 1.9,1.35 1.95,1.4 1.95,2.05 1.9,2.1 1.65,2.1 1.6,2.15 1.6,2.4 1.55,2.45 0.85,2.45 0.8,2.4 0.8,1.4 0.85,1.35
Top Overlay:
  circle w0.25: c-2.5,1.7 r0.125
Top Paste:
  region: -0.85,1.35 -0.8,1.4 -0.8,2.34 -0.85,2.39 -1.49,2.39 -1.54,2.34 -1.54,2.09 -1.59,2.04 -1.79,2.04 -1.84,1.99 -1.84,1.4 -1.79,1.35
  region: -0.85,-1.95 -0.85,-2.35 -0.9,-2.4 -1.52,-2.4 -1.57,-2.35 -1.57,-2.15 -1.62,-2.1 -1.9,-2.1 -1.95,-2.05 -1.95,-1.95 -1.9,-1.9 -0.9,-1.9
  region: 0.85,-1.95 0.85,-2.35 0.9,-2.4 1.52,-2.4 1.57,-2.35 1.57,-2.15 1.62,-2.1 1.9,-2.1 1.95,-2.05 1.95,-1.95 1.9,-1.9 0.9,-1.9
  region: 0.85,1.35 0.8,1.4 0.8,2.34 0.85,2.39 1.49,2.39 1.54,2.34 1.54,2.09 1.59,2.04 1.79,2.04 1.84,1.99 1.84,1.4 1.79,1.35
Top Solder:
  drawing of 4 lines, arcs and shapes, not listed
Mechanical 13:
  circle w0.1: c-1.2,1.7 r0.3
  lines w0.1: -1.8,-2.3 -1.8,2.3 1.8,2.3 1.8,-2.3 -1.8,-2.3
3D body "LM61495RPHR.STEP": height 1.01, standoff 0.01, extent -1.75,-2.25 1.75,2.25